# Altium footprint library conn.PcbLib: 101 footprints (part 1 of 7)
Each footprint in its own frame and in the unit in brackets; x right, y up, seen from the top. Pads: shape width x height; smd on the part's side, far side on the other; paste and mask are expansions set on the pad; w line width, h text height; cw(c..) or ccw(c..) is an arc to the next point about the centre after c.
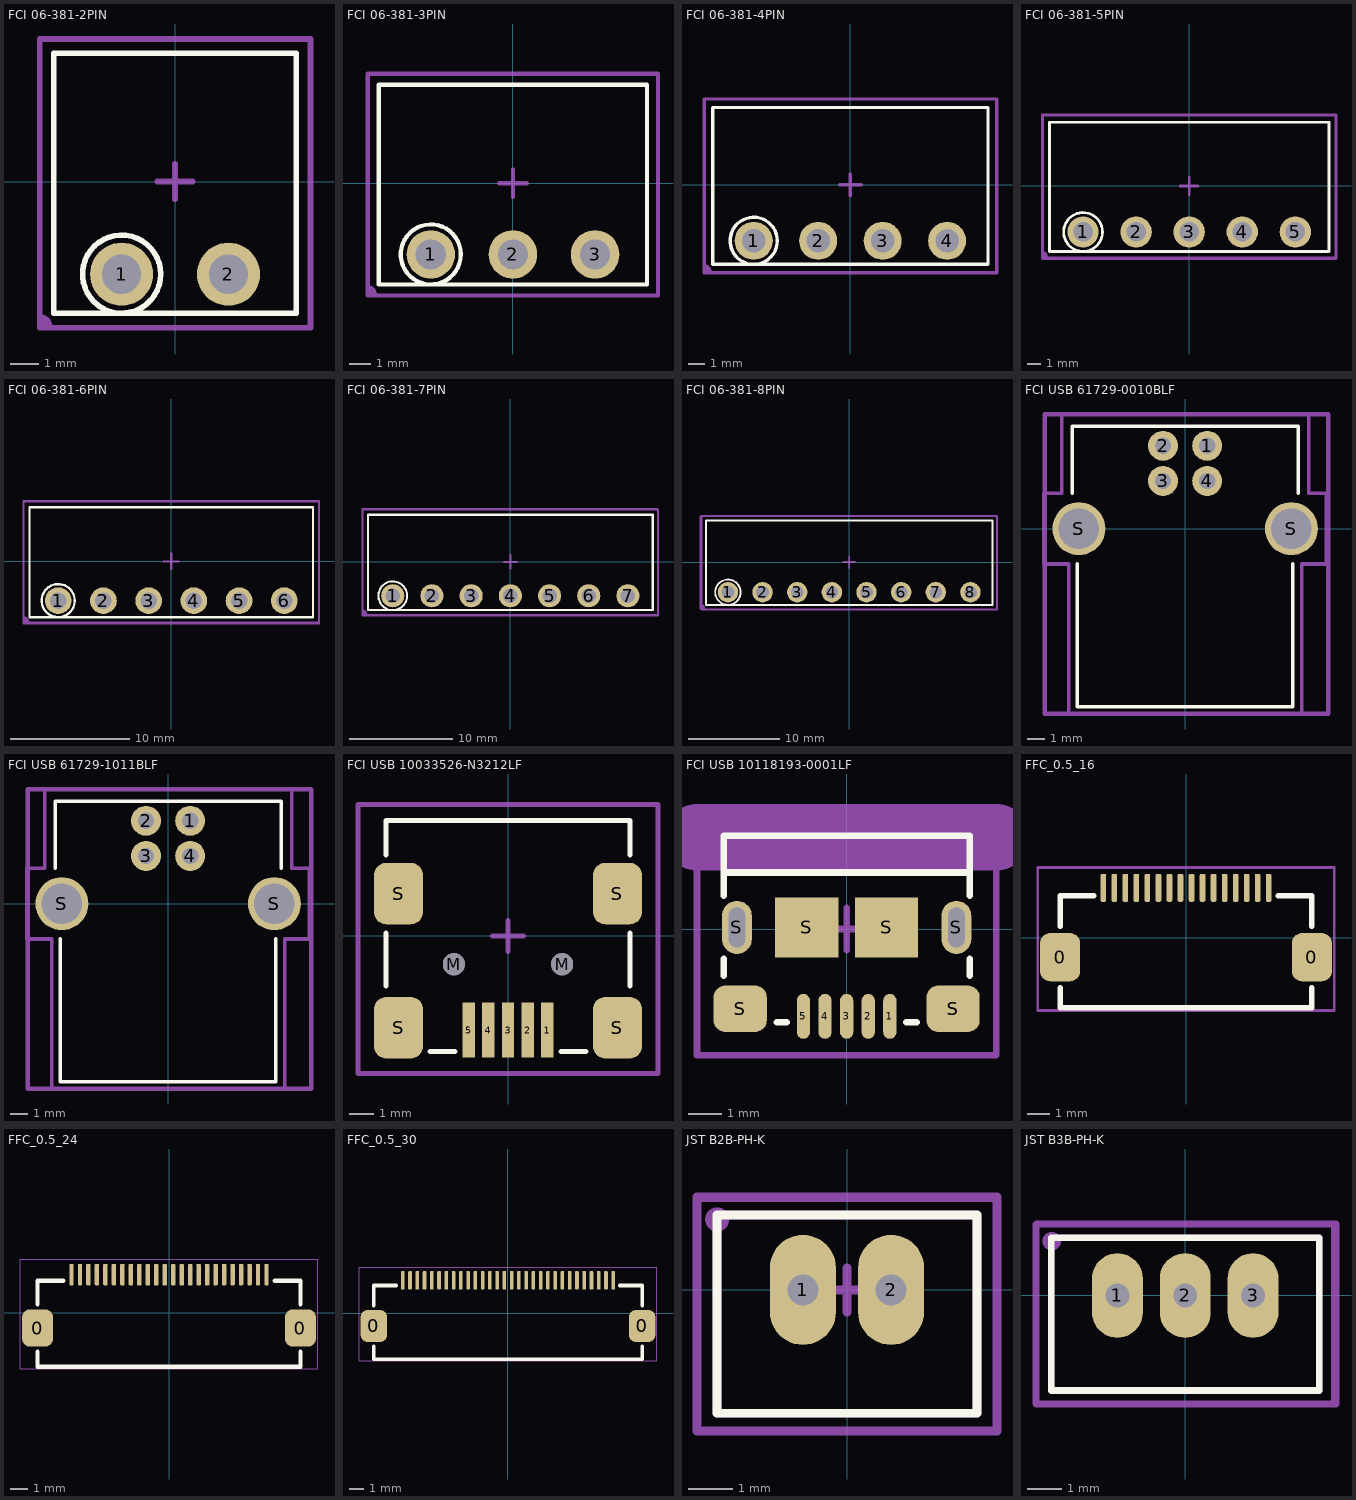
[diagram p0: the footprints below, top view; thin cyan lines are the x and y axes]

## FCI 06-381-2PIN [mm] "FCI Pluggable Terminal Block"
height 7
pads (2):
  round 2.25 hole 1.4: 1(-1.905,-3.302) 2(1.905,-3.302)
Top Overlay:
  circle w0.2: c-1.905,-3.302 r1.393
  lines w0.2: -4.318,-4.699 -4.318,4.572 4.318,4.572 4.318,-4.699 -4.318,-4.699
Top Component:
  region: -4.826,-5.182 -4.388,-5.182 -4.388,-5.098 -4.439,-5.047 -4.439,-4.965 -4.617,-4.787 -4.707,-4.787 -4.744,-4.75 -4.826,-4.75
  lines w0.051: -4.826,-4.75 cw(c-4.826,-5.182) -4.395,-5.182
  lines w0.127: -4.826,-5.182 -4.826,5.08 4.801,5.08 4.801,-5.182 -4.826,-5.182
  text ".Designator" at -0.61,-0.406 h1.52
Component Center:
  lines w0.2: -0.635,0 0.635,0 ; 0,-0.635 0,0.635 ; -4.826,-5.207 4.826,-5.207 4.826,5.08 -4.826,5.08 -4.826,-5.207
3D body "FCI 06-381 2Pos.STEP": height 7.6, standoff -3.52, extent -4.405,-4.699 4.405,4.501

## FCI 06-381-3PIN [mm] "FCI Pluggable Terminal Block"
height 7
pads (3):
  round 2.25 hole 1.4: 1(-3.81,-3.302) 2(0,-3.302) 3(3.81,-3.302)
Top Overlay:
  circle w0.2: c-3.81,-3.302 r1.393
  lines w0.2: -6.223,-4.699 -6.223,4.572 6.223,4.572 6.223,-4.699 -6.223,-4.699
Top Component:
  region: -6.756,-5.182 -6.319,-5.182 -6.319,-5.098 -6.369,-5.047 -6.369,-4.965 -6.547,-4.787 -6.638,-4.787 -6.674,-4.75 -6.756,-4.75
  lines w0.051: -6.756,-4.75 cw(c-6.756,-5.182) -6.325,-5.182
  lines w0.127: -6.756,-5.182 -6.756,5.08 6.706,5.08 6.706,-5.182 -6.756,-5.182
  text ".Designator" at -0.635,-0.406 h1.52
Component Center:
  lines w0.2: -0.635,0 0.635,0 ; 0,-0.635 0,0.635 ; -6.731,-5.207 -6.731,5.08 6.731,5.08 6.731,-5.207 -6.731,-5.207
3D body "FCI 06-381 3Pos.STEP": height 7.6, standoff -3.52, extent -6.31,-4.699 6.31,4.501

## FCI 06-381-4PIN [mm] "FCI Pluggable Terminal Block"
height 7
pads (4):
  round 2.25 hole 1.4: 1(-5.715,-3.302) 2(-1.905,-3.302) 3(1.905,-3.302) 4(5.715,-3.302)
Top Overlay:
  circle w0.2: c-5.715,-3.302 r1.393
  lines w0.2: -8.128,-4.699 -8.128,4.572 8.128,4.572 8.128,-4.699 -8.128,-4.699
Top Component:
  region: -8.636,-5.156 -8.198,-5.156 -8.198,-5.073 -8.249,-5.022 -8.249,-4.939 -8.427,-4.761 -8.517,-4.761 -8.554,-4.725 -8.636,-4.725
  lines w0.051: -8.636,-4.725 cw(c-8.636,-5.156) -8.205,-5.156
  lines w0.127: -8.636,-5.156 8.661,-5.156 8.661,5.105 -8.636,5.105 -8.636,-5.156
  text ".Designator" at -0.813,-0.584 h2.03
Component Center:
  lines w0.2: -0.635,0 0.635,0 ; 0,-0.635 0,0.635 ; -8.636,-5.207 -8.636,5.08 8.636,5.08 8.636,-5.207 -8.636,-5.207
3D body "FCI 06-381 4Pos.STEP": height 7.6, standoff -3.52, extent -8.215,-4.699 8.215,4.501

## FCI 06-381-5PIN [mm] "FCI Pluggable Terminal Block"
height 7
pads (5):
  round 2.25 hole 1.4: 1(-7.62,-3.302) 2(-3.81,-3.302) 3(0,-3.302) 4(3.81,-3.302) 5(7.62,-3.302)
Top Overlay:
  circle w0.2: c-7.62,-3.302 r1.393
  lines w0.2: -10.033,-4.699 10.033,-4.699 10.033,4.572 -10.033,4.572 -10.033,-4.699
Top Component:
  region: -10.566,-5.131 -10.129,-5.131 -10.129,-5.047 -10.179,-4.997 -10.179,-4.914 -10.357,-4.736 -10.448,-4.736 -10.484,-4.7 -10.566,-4.7
  lines w0.051: -10.566,-4.7 cw(c-10.566,-5.131) -10.135,-5.131
  lines w0.127: -10.566,-5.131 10.541,-5.131 10.541,5.131 -10.566,5.131 -10.566,-5.131
  text ".Designator" at -0.838,-0.559 h2.03
Component Center:
  lines w0.2: -0.635,0 0.635,0 ; 0,-0.635 0,0.635 ; -10.541,-5.207 -10.541,5.08 10.541,5.08 10.541,-5.207 -10.541,-5.207
3D body "FCI 06-381 5Pos.STEP": height 7.6, standoff -3.52, extent -10.12,-4.699 10.12,4.501

## FCI 06-381-6PIN [mm] "FCI Pluggable Terminal Block"
height 7
pads (6):
  round 2.25 hole 1.4: 1(-9.525,-3.302) 2(-5.715,-3.302) 3(-1.905,-3.302) 4(1.905,-3.302) 5(5.715,-3.302) 6(9.525,-3.302)
Top Overlay:
  circle w0.2: c-9.525,-3.302 r1.393
  lines w0.2: -11.938,-4.699 11.938,-4.699 11.938,4.572 -11.938,4.572 -11.938,-4.699
Top Component:
  region: -12.395,-5.131 -11.957,-5.131 -11.957,-5.047 -12.008,-4.997 -12.008,-4.914 -12.186,-4.736 -12.277,-4.736 -12.313,-4.7 -12.395,-4.7
  lines w0.051: -12.395,-4.7 cw(c-12.395,-5.131) -11.964,-5.131
  lines w0.127: -12.421,-5.131 -12.421,5.131 12.421,5.131 12.421,-5.131 -12.421,-5.131
  text ".Designator" at -0.838,-0.559 h2.03
Component Center:
  lines w0.2: -0.635,0 0.635,0 ; 0,-0.635 0,0.635 ; -12.446,-5.207 -12.446,5.08 12.446,5.08 12.446,-5.207 -12.446,-5.207
3D body "FCI 06-381 6Pos.STEP": height 7.6, standoff -3.52, extent -12.025,-4.699 12.025,4.501

## FCI 06-381-7PIN [mm] "FCI Pluggable Terminal Block"
height 7
pads (7):
  round 2.25 hole 1.4: 1(-11.43,-3.302) 2(-7.62,-3.302) 3(-3.81,-3.302) 4(0,-3.302) 5(3.81,-3.302) 6(7.62,-3.302) 7(11.43,-3.302)
Top Overlay:
  circle w0.2: c-11.43,-3.302 r1.393
  lines w0.2: -13.843,-4.699 -13.843,4.572 13.843,4.572 13.843,-4.699 -13.843,-4.699
Top Component:
  region: -14.376,-5.131 -13.939,-5.131 -13.939,-5.047 -13.989,-4.997 -13.989,-4.914 -14.167,-4.736 -14.258,-4.736 -14.294,-4.7 -14.376,-4.7
  lines w0.051: -14.376,-4.7 cw(c-14.376,-5.131) -13.945,-5.131
  lines w0.127: -14.376,-5.131 14.351,-5.131 14.351,5.131 -14.376,5.131 -14.376,-5.131
  text ".Designator" at -0.991,-0.711 h2.54
Component Center:
  lines w0.2: -0.635,0 0.635,0 ; 0,-0.635 0,0.635 ; -14.351,-5.207 -14.351,5.08 14.351,5.08 14.351,-5.207 -14.351,-5.207
3D body "FCI 06-381 7Pos.STEP": height 7.6, standoff -3.52, extent -13.93,-4.699 13.93,4.501

## FCI 06-381-8PIN [mm] "FCI Pluggable Terminal Block"
height 7
pads (8):
  round 2.25 hole 1.4: 1(-13.335,-3.302) 2(-9.525,-3.302) 3(-5.715,-3.302) 4(-1.905,-3.302) 5(1.905,-3.302) 6(5.715,-3.302) 7(9.525,-3.302) 8(13.335,-3.302)
Top Overlay:
  circle w0.2: c-13.335,-3.302 r1.393
  lines w0.2: -15.748,-4.699 15.748,-4.699 15.748,4.572 -15.748,4.572 -15.748,-4.699
Top Component:
  region: -16.307,-5.105 -15.869,-5.105 -15.869,-5.022 -15.92,-4.971 -15.92,-4.888 -16.098,-4.711 -16.188,-4.711 -16.225,-4.674 -16.307,-4.674
  lines w0.051: -16.307,-4.674 cw(c-16.307,-5.105) -15.876,-5.105
  lines w0.127: -16.358,-5.131 16.231,-5.131 16.231,5.131 -16.358,5.131 -16.358,-5.131
  text ".Designator" at -1.041,-0.711 h2.54
Component Center:
  lines w0.2: -0.635,0 0.635,0 ; 0,-0.635 0,0.635 ; -16.256,-5.207 -16.256,5.08 16.256,5.08 16.256,-5.207 -16.256,-5.207
3D body "FCI 06-381 8Pos.STEP": height 7.6, standoff -3.52, extent -15.835,-4.699 15.835,4.501

## FCI USB 61729-0010BLF [mm]
height 11
pads (6):
  round 1.7 hole 0.92: 1(1.25,4.7) 2(-1.25,4.7) 3(-1.25,2.71) 4(1.25,2.71)
  round 3 hole 2.3: S(-6.02,0) S(6.02,0)
Top Overlay:
  lines w0.2: -6.4,2 -6.4,5.8 6.4,5.8 6.4,2 ; -6.1,-2 -6.1,-10.1 6.1,-10.1 6.1,-2
Top Component:
  lines w0.254: -7.95,-10.49 8.103,-10.49 8.103,6.477 -7.95,6.477 -7.95,-10.49
  text ".Designator" at -0.559,0.813 h2.03
Component Center:
  lines w0.2: -8,-2 -6.6,-2 -6.6,-10.5 0,-10.5 6.6,-10.5 6.6,-2 8,-2 8,2 7,2 7,6.5 0,6.5 -7,6.5 -7,2 -8,2 -8,-2
3D body "FCI 61729-0010BLF.STEP": height 11, standoff -2.8, extent -6.56,-10.175 6.56,5.765

## FCI USB 61729-1011BLF [mm]
height 11
pads (6):
  round 1.7 hole 0.92: 1(1.25,4.7) 2(-1.25,4.7) 3(-1.25,2.71) 4(1.25,2.71)
  round 3 hole 2.3: S(-6.02,0) S(6.02,0)
Top Overlay:
  lines w0.2: -6.4,2 -6.4,5.8 6.4,5.8 6.4,2 ; -6.1,-2 -6.1,-10.1 6.1,-10.1 6.1,-2
Top Component:
  lines w0.254: -7.95,-10.49 8.103,-10.49 8.103,6.477 -7.95,6.477 -7.95,-10.49
  text ".Designator" at -0.559,0.813 h2.03
Component Center:
  lines w0.2: -8,-2 -6.6,-2 -6.6,-10.5 0,-10.5 6.6,-10.5 6.6,-2 8,-2 8,2 7,2 7,6.5 0,6.5 -7,6.5 -7,2 -8,2 -8,-2
3D body "FCI 61729-1011BLF.STEP": height 11, standoff -2.8, extent -6.56,-10.175 6.56,5.765

## FCI USB 10033526-N3212LF [mm] "USB 2.0 Type B Mini"
height 3.95
pads (11):
  rect 0.5x2.25 smd: 1(1.6,-3.826) 2(0.8,-3.826) 3(0,-3.826) 4(-0.8,-3.826) 5(-1.6,-3.826)
  round 0.9 hole 0.9 unplated: M(-2.2,-1.151) M(2.2,-1.151)
  rrect50% 2x2.5 smd: S(-4.45,-3.731) S(-4.45,1.719) S(4.45,-3.731) S(4.45,1.719)
Top Overlay:
  lines w0.2: -4.953,-2.04 -4.953,0.119 ; -4.953,3.294 -4.953,4.691 4.953,4.691 4.953,3.294 ; -3.175,-4.707 -2.159,-4.707 ; 2.159,-4.707 3.175,-4.707 ; 4.953,-2.04 4.953,0.119
Top Component:
  lines w0.051: -6.096,-5.588 -6.096,5.334 6.096,5.334 6.096,-5.588 -6.096,-5.588
  text ".Designator" at -0.813,-0.533 h2.03
Component Center:
  lines w0.2: -0.635,0 0.635,0 ; 0,-0.635 0,0.635 ; -6.096,-5.588 -6.096,5.334 6.096,5.334 6.096,-5.588 -6.096,-5.588
3D body "FCI USB 10033526-N3212LF.STEP": height 4.01, standoff -0.99, extent -4.95,-4.701 4.95,4.699

## FCI USB 10118193-0001LF [mm] "USB 2.0 Type B Micro"
height 3.1
pads (11):
  oval 0.4x1.35 smd: 1(1.3,-2.625) 2(0.65,-2.625) 3(0,-2.625) 4(-0.65,-2.625) 5(-1.3,-2.625)
  oval 0.9x1.6 hole 0.5 slot 1.2 at 90 deg: S(-3.3,0.05) S(3.3,0.05)
  rrect50% 1.6x1.4 smd: S(-3.2,-2.4) S(3.2,-2.4)
  rect 1.9x1.8 smd: S(-1.2,0.05) S(1.2,0.05)
Top Overlay:
  lines w0.2: -3.7,-1.4 -3.7,-0.9 ; -3.7,1 -3.7,1.7 ; -2.1,-2.8 -1.8,-2.8 ; 1.8,-2.8 2.1,-2.8 ; 3.7,-1.4 3.7,-0.9 ; 3.7,1 3.7,1.7 ; -3.7,1.7 -3.7,2.8 3.7,2.8 3.7,1.7 ; -3.7,1.7 3.7,1.7
Top Component:
  lines w0.051: -4.496,-3.785 -4.496,3.2 4.521,3.2 4.521,-3.785 -4.496,-3.785
  text ".Designator" at -0.813,-0.533 h2.03
Component Center:
  lines w0.2: -0.635,0 0.635,0 ; 0,-0.635 0,0.635 ; -4.5,-3.8 -4.5,3.2 4.5,3.2 4.5,-3.8 -4.5,-3.8
Component Mask:
  lines w2: -4.5,2.754 0,2.754 4.5,2.754
3D body "FCI USB 10118193-0001lfc.STEP": height 2.78, standoff -0.82, extent -3.929,-2.9 3.928,2.76

## FFC_0.5_16 [mil]
height 78.74
pads (18):
  rrect50% 72x86 smd: 0(-225,-35) 0(225,-35)
  rrect50% 10x50 smd: 1(-147.64,89) 2(-127.95,89) 3(-108.27,89) 4(-88.58,89) 5(-68.9,89) 6(-49.21,89) 7(-29.53,89) 8(-9.84,89) 9(9.84,89) 10(29.53,89) 11(49.21,89) 12(68.9,89) 13(88.58,89) 14(108.27,89) 15(127.95,89) 16(147.64,89)
Top Overlay:
  lines w10: -225,-90 -225,-125 225,-125 225,-90 ; -225,20 -225,75 -165,75 ; 165,75 225,75 225,20
Top Component:
  lines w5: -265,-130 -265,125 265,125 265,-130 -265,-130
  text ".Designator" at -24,-16 h60
3D body "ffc_fpc_affc20-16-050-shb-t.stp": height 81.71, standoff -1.16, extent -265.75,-130.07 265.75,80

## FFC_0.5_24 [mm]
height 2
pads (26):
  rrect50% 1.829x2.184 smd: 0(-7.747,-0.889) 0(7.747,-0.889)
  rrect50% 0.254x1.27 smd: 1(-5.75,2.26) 2(-5.25,2.26) 3(-4.75,2.26) 4(-4.25,2.26) 5(-3.75,2.26) 6(-3.25,2.26) 7(-2.75,2.26) 8(-2.25,2.26) 9(-1.75,2.26) 10(-1.25,2.26) 11(-0.75,2.26) 12(-0.25,2.26) 13(0.25,2.26) 14(0.75,2.26) 15(1.25,2.26) 16(1.75,2.26) 17(2.25,2.26) 18(2.75,2.26) 19(3.25,2.26) 20(3.75,2.26) 21(4.25,2.26) 22(4.75,2.26) 23(5.25,2.26) 24(5.75,2.26)
Top Overlay:
  lines w0.254: -7.747,-2.286 -7.747,-3.175 7.747,-3.175 7.747,-2.286 ; -7.747,0.508 -7.747,1.905 -6.223,1.905 ; 6.223,1.905 7.747,1.905 7.747,0.508
Top Component:
  lines w0.051: -8.763,-3.302 -8.763,3.175 8.763,3.175 8.763,-3.302 -8.763,-3.302
  text ".Designator" at -0.813,-0.559 h2.03
3D body "ffc_fpc_affc20-24-050-shb-t.stp": height 2.08, standoff -0.03, extent -8.75,-3.294 8.75,2.042

## FFC_0.5_30 [mm]
height 2
pads (32):
  rrect50% 1.829x2.184 smd: 0(-9.247,-0.889) 0(9.247,-0.889)
  rrect50% 0.254x1.27 smd: 1(-7.25,2.26) 2(-6.75,2.26) 3(-6.25,2.26) 4(-5.75,2.26) 5(-5.25,2.26) 6(-4.75,2.26) 7(-4.25,2.26) 8(-3.75,2.26) 9(-3.25,2.26) 10(-2.75,2.26) 11(-2.25,2.26) 12(-1.75,2.26) 13(-1.25,2.26) 14(-0.75,2.26) 15(-0.25,2.26) 16(0.25,2.26) 17(0.75,2.26) 18(1.25,2.26) 19(1.75,2.26) 20(2.25,2.26) 21(2.75,2.26) 22(3.25,2.26) 23(3.75,2.26) 24(4.25,2.26) 25(4.75,2.26) 26(5.25,2.26) 27(5.75,2.26) 28(6.25,2.26) 29(6.75,2.26) 30(7.25,2.26)
Top Overlay:
  lines w0.254: -9.247,-2.286 -9.247,-3.175 9.247,-3.175 9.247,-2.286 ; -9.247,0.508 -9.247,1.905 -7.723,1.905 ; 7.723,1.905 9.247,1.905 9.247,0.508
Top Component:
  lines w0.051: -10.263,-3.302 -10.263,3.175 10.263,3.175 10.263,-3.302 -10.263,-3.302
  text ".Designator" at -1.041,-0.711 h2.54

## JST B2B-PH-K [mm]
height 6
pads (2):
  oval 1.5x2.5 hole 0.7: 1(-1,0) 2(1,0)
Top Overlay:
  lines w0.2: -2.95,-2.8 -2.95,1.7 2.95,1.7 2.95,-2.8 -2.95,-2.8
Bottom Overlay:
  circle w0.254: c-2.1,1.1 r0.141
Mechanical 13:
  lines w0.2: -2.95,-2.8 2.95,-2.8 2.95,1.7 -2.95,1.7 -2.95,-2.8
Top Component:
  circle w0.051: c-2.946,1.6 r0.25
  region: -2.946,1.35 -2.996,1.35 -3.088,1.388 -3.158,1.458 -3.197,1.55 -3.197,1.6 -3.197,1.65 -3.158,1.742 -3.088,1.812 -2.996,1.85 -2.946,1.85 -2.897,1.85 -2.805,1.812 -2.734,1.742 -2.696,1.65 -2.696,1.6 -2.696,1.55 -2.734,1.458 -2.805,1.388 -2.897,1.35
  lines w0.203: -3.404,-3.2 3.404,-3.2 3.404,2.108 -3.404,2.108 -3.404,-3.2
  text ".Designator" at -0.61,-0.432 h1.52
Component Center:
  lines w0.2: -0.5,0 0.5,0 ; 0,-0.5 0,0.5 ; -3.4,-3.2 -3.4,2.1 3.4,2.1 3.4,-3.2 -3.4,-3.2
3D body "JST B2B-PH-K-S.STEP": height 6, standoff -3.4, extent -2.95,-2.8 2.95,1.7

## JST B3B-PH-K [mm]
height 6
pads (3):
  oval 1.5x2.5 hole 0.7: 1(-2,0) 2(0,0) 3(2,0)
Top Overlay:
  lines w0.2: -3.95,-2.8 3.95,-2.8 3.95,1.7 -3.95,1.7 -3.95,-2.8
Bottom Overlay:
  circle w0.254: c-3.1,1.1 r0.141
Mechanical 13:
  lines w0.2: -3.95,-2.8 -3.95,1.7 3.95,1.7 3.95,-2.8 -3.95,-2.8
Top Component:
  circle w0.051: c-3.937,1.6 r0.25
  region: -3.937,1.35 -3.987,1.35 -4.079,1.388 -4.149,1.458 -4.187,1.55 -4.187,1.6 -4.187,1.65 -4.149,1.742 -4.079,1.812 -3.987,1.85 -3.937,1.85 -3.887,1.85 -3.795,1.812 -3.725,1.742 -3.687,1.65 -3.687,1.6 -3.687,1.55 -3.725,1.458 -3.795,1.388 -3.887,1.35
  lines w0.203: -4.394,-3.2 4.445,-3.2 4.445,2.108 -4.394,2.108 -4.394,-3.2
  text ".Designator" at -0.813,-0.61 h2.03
Component Center:
  lines w0.2: -0.5,0 0.5,0 ; 0,-0.5 0,0.5 ; -4.4,-3.2 4.4,-3.2 4.4,2.1 -4.4,2.1 -4.4,-3.2
3D body "JST B3B-PH-K-S.STEP": height 6, standoff -3.4, extent -3.95,-2.8 3.95,1.7